# Altium schematic symbol library LM399AH#PBF.SchLib: 1 symbol
Pins are listed as number, name and electrical type; pins without a type are passive.

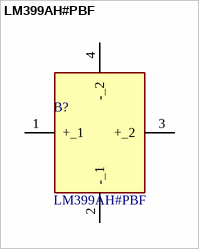
[diagram p0: symbol LM399AH#PBF]

## LM399AH#PBF
designator B?
V-Ref Precision 6.95V 10mA 4-Pin TO-46 Tray; Manufacturer_Name: Analog Devices; Geometry.Height: 2.667mm; Mouser Part Number: 584-LM399AH#PBF; Mouser Price/Stock: https://www.mouser.co.uk/ProductDetail/Analog-Devices/LM399AHPBF?qs=ytflclh7QUUM8sawX7U9qQ%3D%3D; Manufacturer_Part_Number: LM399AH#PBF; Datasheet Link: https://www.analog.com/media/en/technical-documentation/data-sheets/199399fc.pdf
footprint LM399AHPBF
pins: 1 +_1, 2 -_1, 3 +_2, 4 -_2